# Altium schematic symbol library IntegratedCircuit.SchLib: 131 symbols (part 1 of 3)
Pins are listed as number, name and electrical type; pins without a type are passive.

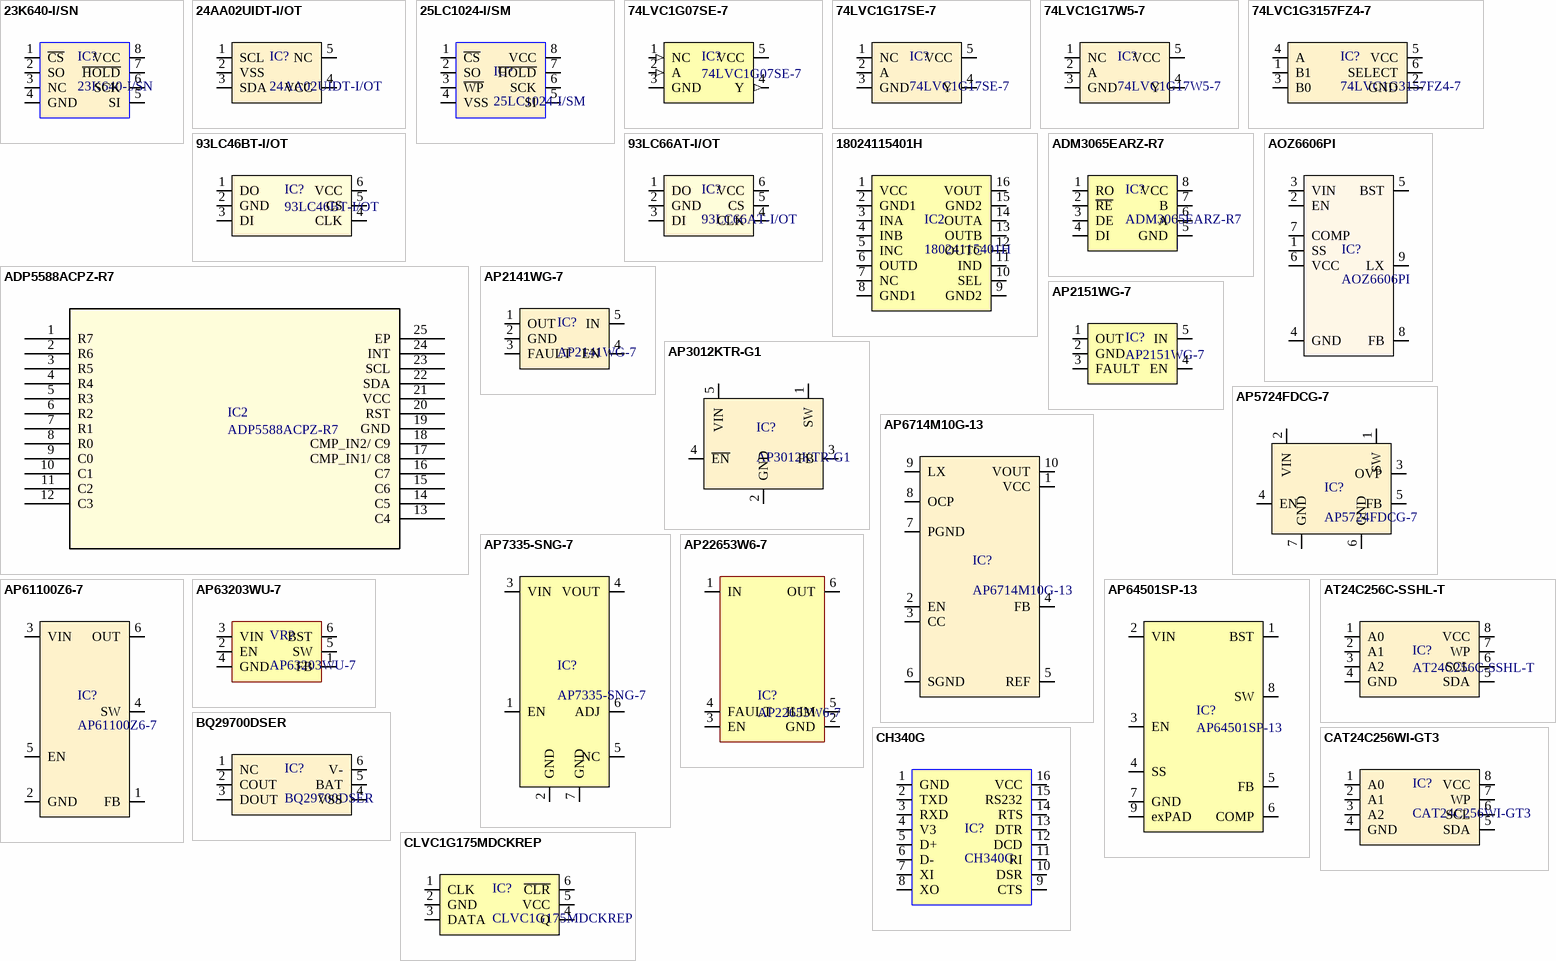
[diagram p0: symbols 23K640-I/SN to CLVC1G175MDCKREP]

## 23K640-I/SN
designator IC?
23K640 Series 2.7 V to 3.6 V 64 kbit SPI Bus Low-Power Serial SRAM - SOIC-8; Manufacturer: Microchip; Organization: 8192 x 8; Purpose Of Usage: BASIC; Supplier 1: Digi-Key; Manufacturer Part Number: 23K640-I/SN; RoHS: YES; Category: INTEGRATED CIRCUITS; Mount: SMD; Case/Package: SOIC; Package Quantity: 100; Lead Free: Lead Free; Supplier Part Number 1: 23K640-I/SN-ND; Sub-Category: MEMORY- RAM; Stock ID: ??
footprint SOIC127P600X175-8N (SOIC, 8-Leads, Body 4.90x3.90mm, Pitch 1.27mm, IPC Medium Density)
pins: 1 ~{CS}, 2 SO, 3 NC, 4 GND, 5 SI, 6 SCK, 7 ~{HOLD}, 8 VCC (power)

## 24AA02UIDT-I/OT
designator IC?
24AA02 Series 2 Kbit (256 x 8) 5.5 V Surface Mount I2C Serial EEPROM - SOT-23-5; Manufacturer: Microchip; Organization: 256X8; Purpose Of Usage: BASIC; Supplier 1: Digi-Key; Manufacturer Part Number: 24AA02UIDT-I/OT; RoHS: YES; Category: INTEGRATED CIRCUITS; Stock 1: 1978; Case/Package: SOT-23-5; Package Quantity: 3000; Lead Free: Lead Free; Supplier Part Number 1: 24AA02UIDT-I/OTTR-ND; Local Supplier: FUTURE; Mount: SMD; Price 10K: 0.25; Stock ID: ??; Sub-Category: MEMORY - EEPROM
footprint SOT23-5 (SOT23, 6-Leads, Body 2.73x2.80mm, Pitch 0.95mm, IPC Medium Density)
pins: 1 SCL, 2 VSS, 3 SDA, 4 VCC, 5 NC

## 25LC1024-I/SM
designator IC?
EEPROM, SERIAL, 1024KBIT, 20MHZ, 8SOIJ; Manufacturer: Microchip; Purpose Of Usage: BASIC; Supplier 1: Digi-Key; Manufacturer Part Number: 25LC1024-I/SM; RoHS: YES; Stock 1: 8902; Mount: SMD; Case/Package: SOIC; Package Quantity: 90; Lead Free: Lead Free; Supplier Part Number 1: 25LC1024-I/SM-ND; Category: INTEGRATED CIRCUITS; Sub-Category: MEMORY - EEPROM; Stock ID: ??
footprint SOIJ8-M_MC-M
pins: 1 ~{CS}, 2 SO, 3 ~{WP}, 4 VSS, 5 SI, 6 SCK, 7 ~{HOLD}, 8 VCC

## 74LVC1G07SE-7
designator IC?
Buffer/Driver 1-CH Non-Inverting Open Drain CMOS 5-Pin SOT-353 T/R; Manufacturer: Diodes; Purpose Of Usage: BASIC; Supplier 1: Digi-Key; Supplier Part Number 1: 74LVC1G07SE-7DICT-ND; Manufacturer Part Number: 74LVC1G07SE-7; Stock 1: 16164; RoHS: YES; Mount: SMD; Case/Package: SOT-353; Package Quantity: 3000; Lead Free: Lead Free; Category: INTEGRATED CIRCUITS; Sub-Category: LOGIC; Stock ID: ??
footprint SOT353
pins: 1 NC (in), 2 A (in), 3 GND (power), 4 Y (out), 5 VCC (power)

## 74LVC1G17SE-7
designator IC?
74LVC Series 5.5 V Surface Mount Single Schmitt Trigger Buffer - SOT-353; Manufacturer: Diodes; Purpose Of Usage: BASIC; Manufacturer Part Number: 74LVC1G17SE-7; RoHS: YES; Category: INTEGRATED CIRCUITS; Case/Package: SOT-353; Lead Free: Lead Free; Local Supplier: FUTURE; Mount: SMD; Price 10K: 0.05; Stock ID: ??; Sub-Category: LOGIC; Supplier 1: Digi-Key; Supplier Part Number 1: 74LVC1G17SE-7CT-ND
footprint SOT353 (SOTFL, 6-Leads, Body 1.55x1.58mm, Pitch 0.50mm, IPC Medium Density)
pins: 1 NC, 2 A, 3 GND, 4 Y, 5 VCC

## 74LVC1G17W5-7
designator IC?
74LVC Series 1.65 to 5.5V Single Schmitt-Trigger Buffer SMT - SOT-25; Manufacturer: Diodes; Purpose Of Usage: BASIC; Supplier 1: Digi-Key; Manufacturer Part Number: 74LVC1G17W5-7; RoHS: YES; Category: INTEGRATED CIRCUITS; Stock 1: 117000; Case/Package: SOT-23-5; Package Quantity: 3000; Lead Free: Lead Free; Supplier Part Number 1: 74LVC1G17W5-7TR-ND; Local Supplier: FUTURE; Mount: SMD; Price 10K: 0.05; Stock ID: ??; Sub-Category: LOGIC
footprint SOT23-5 (SOT23, 6-Leads, Body 2.73x2.80mm, Pitch 0.95mm, IPC Medium Density)
pins: 1 NC, 2 A, 3 GND, 4 Y, 5 VCC

## 74LVC1G3157FZ4-7
designator IC?
Analog Switch Single SPDT 6-Pin X2-DFN T/R; Manufacturer: Diodes; Purpose Of Usage: BASIC; Supplier 1: Digi-Key; Manufacturer Part Number: 74LVC1G3157FZ4-7; RoHS: YES; Category: INTEGRATED CIRCUITS; Stock 1: 130000; Supplier Part Number 1: 74LVC1G3157FZ4-7DITR-ND; Case/Package: UDFN1410-6; Mount: SMD; Stock ID: ??; Sub-Category: ANALOG SWITCH; Lead Free: Lead Free
footprint X2-DFN1410-6 (SON, 6-Leads, Body 1.98x1.98mm, Pitch 0.65mm, Thermal Pad 1.60x0.91mm, IPC Medium Density)
pins: 1 B1, 2 GND, 3 B0, 4 A, 5 VCC, 6 SELECT

## 93LC46BT-I/OT
designator IC?
MICROCHIP - 93LC46BT-I/OT - EEPROM, Microwire, 1 Kbit, 64 x 16bit, Serial Microwire, 3 MHz, SOT-23, 6 Pins; Purpose Of Usage: BASIC; Supplier 1: Digi-Key; Supplier Part Number 1: 93LC46BT-I/OTCT-ND; Manufacturer: Microchip; Manufacturer Part Number: 93LC46BT-I/OT; Stock 1: 3299; RoHS: YES; Mount: SMD; Case/Package: SOT-23; Package Quantity: 3000; Lead Free: Lead Free; Category: INTEGRATED CIRCUITS; Sub-Category: MEMORY - EEPROM; Stock ID: ??
footprint SOT 23-6
pins: 1 DO, 2 GND, 3 DI, 4 CLK, 5 CS, 6 VCC

## 93LC66AT-I/OT
designator IC?
Microwire Serial EEPROM Family, 2.5Vto 5.5V' 2 MHz, -40°Cto 125°C, SOT-23-6, RoHS; Manufacturer: Microchip; Organization: 512X8; Purpose Of Usage: BASIC; Supplier 1: Digi-Key; Manufacturer Part Number: 93LC66AT-I/OT; RoHS: YES; Category: INTEGRATED CIRCUITS; Stock 1: 42000; Case/Package: SOT-23; Package Quantity: 3000; Lead Free: Lead Free; Supplier Part Number 1: 93LC66AT-I/OTTR-ND; Mount: SMD; Stock ID: ??; Sub-Category: MEMORY - EEPROM
footprint SOT23-6 (SOT23, 6-Leads, Body 2.73x2.80mm, Pitch 0.95mm, IPC Medium Density)
pins: 1 DO, 2 GND, 3 DI, 4 CLK, 5 CS, 6 VCC

## 18024115401H
designator IC2
WPME-CDIP Capacitive Digital Isolator Powered; Manufacturer: Wurth Elektronik; Purpose Of Usage: BASIC; Manufacturer Part Number: 18024115401H; Category: INTEGRATED CIRCUITS; Max Operating Temperature: 125°C; Min Operating Temperature: -40°C; Case/Package: SOIC-16W; Lead Free: Lead Free; Mount: SMD; MSL: 1; RoHS: YES; Stock ID: ??; Sub-Category: ISOLATOR; Supplier 1: Digi-Key; Supplier Part Number 1: 732-18024115401HTR-ND
footprint WPME-CDIP_SOIC-16WB
pins: 1 VCC, 2 GND1, 3 INA, 4 INB, 5 INC, 6 OUTD, 7 NC, 8 GND1, 9 GND2, 10 SEL, 11 IND, 12 OUTC, 13 OUTB, 14 OUTA, 15 GND2, 16 VOUT

## ADM3065EARZ-R7
designator IC?
3.0 V to 5.5 V, ±12 kV IEC ESD Protected, Half Duplex 50 Mbps RS-485 Transceiver; Manufacturer: Analog Devices; Max Supply Voltage: 5.5V; Min Supply Voltage: 3V; Purpose Of Usage: BASIC; Manufacturer Part Number: ADM3065EARZ-R7; RoHS: YES; Category: INTEGRATED CIRCUITS; Max Operating Temperature: 85°C; Min Operating Temperature: -40°C; Case/Package: SOIC; Lead Free: Lead Free; Mount: SMD; MSL: 1; Stock ID: ??; Sub-Category: RS485 DRIVER; Supplier 1: Digi-Key; Supplier Part Number 1: 505-ADM3065EARZ-R7TR-ND
footprint SO08
pins: 1 RO, 2 ~{RE}, 3 DE, 4 DI, 5 GND, 6 A, 7 B, 8 VCC

## ADP5588ACPZ-R7
designator IC2
IC KEYPAD SCANNER GPIO PORT EXP; Manufacturer: Analog Devices; Purpose Of Usage: BASIC; Supplier 1: Digi-Key; Manufacturer Part Number: ADP5588ACPZ-R7; Stock 1: 100; RoHS: YES; Mount: SMD; Case/Package: LFCSP EP; Package Quantity: 1500; Lead Free: Contains Lead; Supplier Part Number 1: ADP5588ACPZ-R7DKR-ND; Category: INTEGRATED CIRCUITS; Sub-Category: KEYPAD READER; Stock ID: ??
footprint CP_24_1
pins: 1 R7, 2 R6, 3 R5, 4 R4, 5 R3, 6 R2, 7 R1, 8 R0, 9 C0, 10 C1, 11 C2, 12 C3, 13 C4, 14 C5, 15 C6, 16 C7, 17 CMP_IN1/ C8, 18 CMP_IN2/ C9, 19 GND, 20 RST, 21 VCC (power), 22 SDA, 23 SCL, 24 INT, 25 EP

## AOZ6606PI
designator IC?
Switching Regulator, Current-mode, 6A, 650kHz Switching Freq-Max, PDSO8; Manufacturer: Alpha & Omega Semiconductor; Max Supply Voltage: 15.3V; Min Supply Voltage: 4.5V; Purpose Of Usage: BASIC; Topology: BUCK; Manufacturer Part Number: AOZ6606PI; RoHS: YES; Category: INTEGRATED CIRCUITS; Case/Package: SO-08 EP; Lead Free: Lead Free; Max Operating Temperature: 85°C; Min Operating Temperature: -40°C; Mount: SMD; Stock ID: ??; Sub-Category: PMIC - DC/DC Switching Regulator; Supplier 1: Digi-Key; Supplier Part Number 1: 785-1854-1-ND
footprint SO08 - EP1
pins: 1 SS, 2 EN, 3 VIN, 4 GND, 5 BST, 6 VCC, 7 COMP, 8 FB, 9 LX

## AP2141WG-7
designator IC?
IC PWR SW USB 1CH 0.5A SOT-25-5; Manufacturer: Diodes; Purpose Of Usage: BASIC; Supplier 1: Avnet; Supplier Part Number 1: AP2141WG-7; Manufacturer Part Number: AP2141WG-7; Stock 1: 3000; RoHS: YES; Mount: SMD; Case/Package: SOT-23-5; Package Quantity: 3000; Lead Free: Lead Free; Category: INTEGRATED CIRCUITS; Sub-Category: POWER SWITCH; Stock ID: ??
footprint SOT23-5
pins: 1 OUT, 2 GND, 3 FAULT, 4 EN, 5 IN

## AP2151WG-7
designator IC?
DIODES INC.         AP2151WG-7             Power Load Switch, Current Limited, Single High Side, Active High, 1 Output, 5.5V, 0.8A, SOT-25-5; Purpose Of Usage: BASIC; Topology: HIGH SIDE SWITCH; Min Supply Voltage: 2.7V; Supplier 1: Digi-Key; Manufacturer: Diodes; Manufacturer Part Number: AP2151WG-7; Stock 1: 5836; RoHS: YES; Mount: SMD; Case/Package: SOT-23-5; Package Quantity: 3000; Lead Free: Lead Free; Category: INTEGRATED CIRCUITS; Sub-Category: POWER SWITCH; Supplier Part Number 1: AP2151WGDITR-ND; Stock ID: ??; Max Operating Temperature: +85C; Min Operating Temperature: -40C; Max Supply Voltage: 5.5V
footprint SOT23-5
pins: 1 OUT, 2 GND, 3 FAULT, 4 EN, 5 IN

## AP3012KTR-G1
designator IC?
Boost Switching Regulator IC Positive Adjustable 1.25V 1 Output 500mA (Switch) SC-74A, SOT-753; Manufacturer: Diodes; Purpose Of Usage: BASIC; Supplier 1: Digi-Key; Manufacturer Part Number: AP3012KTR-G1; RoHS: YES; Category: INTEGRATED CIRCUITS; Stock 1: 356500; Case/Package: SOT-23-5; Package Quantity: 3000; Topology: BOOST; Lead Free: Lead Free; Supplier Part Number 1: AP3012KTR-G1DITR-ND; Local Supplier: FUTURE; Mount: SMD; Price 10K: 0.05; Stock ID: ??; Sub-Category: PMIC - DC/DC Switching Regulator
footprint SOT23-5 (SOT23, 6-Leads, Body 2.73x2.80mm, Pitch 0.95mm, IPC Medium Density)
pins: 1 SW, 2 GND, 3 FB, 4 ~{EN}, 5 VIN

## AP5724FDCG-7
designator IC?
AP5724 Series 2.7 to 5.5 V 1.2 MHz Boost SMT White LED Converter - DFN-6; Manufacturer: Diodes; Purpose Of Usage: BASIC; Supplier 1: Mouser; Manufacturer Part Number: AP5724FDCG-7; RoHS: YES; Category: INTEGRATED CIRCUITS; Stock 1: 11765; Case/Package: DFN EP; Package Quantity: 3000; Lead Free: Lead Free; Supplier Part Number 1: 621-AP5724FDCG-7; Mount: SMD; Stock ID: ??; Sub-Category: PMIC - DC/DC Switching Regulator; Local Supplier: FUTURE; Price 10K: 0.27; Topology: BOOST
footprint U-DFN2020-6 TYPE-C (SON, 6-Leads, Body 1.98x1.98mm, Pitch 0.65mm, Thermal Pad 1.60x0.91mm, IPC Medium Density)
pins: 1 SW, 2 VIN, 3 OVP, 4 EN, 5 FB, 6 GND, 7 GND

## AP6714M10G-13
designator IC?
Conv DC-DC 0.9V to 5.5V Synchronous Step Up Single-Out 1.8V to 5.5V 1.6A 10-Pin MSOP T/R; Manufacturer: Diodes; Topology: BOOST; Purpose Of Usage: BASIC; Supplier 1: Digi-Key; Manufacturer Part Number: AP6714M10G-13; RoHS: YES; Category: INTEGRATED CIRCUITS; Case/Package: MSOP; Package Quantity: 1; Lead Free: Lead Free; Supplier Part Number 1: AP6714M10GDITR-ND; Local Supplier: FUTURE; Mount: SMD; Price 10K: 0.25; Stock ID: ??; Sub-Category: PMIC - DC/DC Switching Regulator
footprint MSOP-10 (TSOP, 8-Leads, Body 2.95x2.95mm, Pitch 0.65mm, IPC Medium Density)
pins: 1 VCC, 2 EN, 3 CC, 4 FB, 5 REF, 6 SGND, 7 PGND, 8 OCP, 9 LX, 10 VOUT

## AP7335-SNG-7
designator IC?
LDO Regulator Pos 0.8V to 5V 0.3A 6-Pin DFN EP T/R; Manufacturer: Diodes; Purpose Of Usage: BASIC; Max Supply Voltage: 6V; Supplier 1: Digi-Key; Manufacturer Part Number: AP7335-SNG-7; RoHS: YES; Category: INTEGRATED CIRCUITS; Case/Package: DFN EP; Package Quantity: 3000; Supplier Part Number 1: AP7335-SNG-7DI-ND; Lead Free: Lead Free; Mount: SMD; Stock ID: ??; Sub-Category: PMIC - LINEAR REGULATOR; Local Supplier: FUTURE; Price 10K: 0.0918; Topology: LDO; Max Operating Temperature: +85; Min Operating Temperature: -40; Min Supply Voltage: 0.8V
footprint U-DFN2020-6 TYPE-C (SON, 6-Leads, Body 1.98x1.98mm, Pitch 0.65mm, Thermal Pad 1.60x0.91mm, IPC Medium Density)
pins: 1 EN, 2 GND, 3 VIN, 4 VOUT, 5 NC, 6 ADJ, 7 GND

## AP22653W6-7
designator IC?
Power Switch/Driver 1:1 P-Channel 2.1A SOT-23-6; Manufacturer: Diodes; Purpose Of Usage: BASIC; Supplier 1: Digi-Key; Manufacturer Part Number: AP22653W6-7; Stock 1: 12659; RoHS: NO; Supplier Part Number 1: 31-AP22653W6-7CT-ND; Category: INTEGRATED CIRCUITS; Sub-Category: POWER SWITCH; Mount: SMD; Case/Package: SOT-23-6; Lead Free: Lead Free; Stock ID: ??
footprint SOT23-6 (SOT23, 6-Leads, Body 2.73x2.80mm, Pitch 0.95mm, IPC Medium Density)
pins: 1 IN, 2 GND, 3 EN, 4 FAULT, 5 ILIM, 6 OUT

## AP61100Z6-7
designator IC?
Converter DC to DC Synchronous Buck 0.8V to 7V 3A 6-Pin SOT-563 T/R; Manufacturer: Diodes; Purpose Of Usage: BASIC; Supplier 1: Digi-Key; Manufacturer Part Number: AP61100Z6-7; RoHS: YES; Category: INTEGRATED CIRCUITS; Stock 1: 237789; Supplier Part Number 1: 31-AP61100Z6-7DKR-ND; Case/Package: SOT563; Lead Free: Lead Free; Mount: SMD; Package Quantity: 3000; Stock ID: ??; Sub-Category: PMIC - DC/DC Switching Regulator; Local Supplier: FUTURE; Price 10K: 0.07; Topology: BUCK
footprint SOT563 (SOTFL, 6-Leads, Body 1.55x1.58mm, Pitch 0.50mm, IPC Medium Density)
pins: 1 FB, 2 GND, 3 VIN, 4 SW, 5 EN, 6 OUT

## AP63203WU-7
designator VR?
Manufacturer: Diodes; Purpose Of Usage: BASIC; Topology: BUCK; Supplier 1: Digi-Key; Manufacturer Part Number: AP63203WU-7; Stock 1: 2397; RoHS: NO; Supplier Part Number 1: AP63203WU-7DICT-ND; Category: INTEGRATED CIRCUITS; Mount: SMD; Sub-Category: PMIC - DC/DC Switching Regulator; Case/Package: TSOT-26; Lead Free: Lead Free; Stock ID: ??
footprint TSOT26
pins: 1 FB, 2 EN, 3 VIN, 4 GND, 5 SW, 6 BST

## AP64501SP-13
designator IC?
Buck Switching Regulator IC Positive Adjustable 0.8V 1 Output 5A 8-SOIC (0.154", 3.90mm Width) Exposed Pad; Manufacturer: Diodes; Purpose Of Usage: BASIC; Max Supply Voltage: 40V; Min Supply Voltage: 3.8V; Supplier 1: Digi-Key; Manufacturer Part Number: AP64501SP-13; Stock 1: 17836; RoHS: NO; Category: INTEGRATED CIRCUITS; Supplier Part Number 1: 31-AP64501SP-13CT-ND; Mount: SMD; Sub-Category: PMIC - DC/DC Switching Regulator; Case/Package: SO-8EP; Lead Free: Lead Free; Stock ID: ??; Topology: BUCK; Max Operating Temperature: -40; Min Operating Temperature: +85
footprint SO08 - EP1
pins: 1 BST, 2 VIN, 3 EN, 4 SS, 5 FB, 6 COMP, 7 GND, 8 SW, 9 exPAD

## AT24C256C-SSHL-T
designator IC?
EEPROM Serial-2Wire 256K-bit 32K x 8 1.8V/2.5V/3.3V/5V 8-Pin SOIC T/R; Manufacturer: Microchip / Atmel; Purpose Of Usage: BASIC; Supplier 1: Digi-Key; Manufacturer Part Number: AT24C256C-SSHL-T; Stock 1: 15972; RoHS: YES; Mount: SMD; Case/Package: SOIC; Package Quantity: 1; Lead Free: Lead Free; Category: INTEGRATED CIRCUITS; Supplier Part Number 1: AT24C256C-SSHL-TCT-ND; Sub-Category: MEMORY - EEPROM; Stock ID: ??
footprint SOIC127P600X175-8N (SOIC, 8-Leads, Body 4.90x3.90mm, Pitch 1.27mm, IPC Medium Density)
pins: 1 A0, 2 A1, 3 A2, 4 GND, 5 SDA, 6 SCL, 7 WP, 8 VCC

## BQ29700DSER
designator IC?
Li-Ion/Li Polymer Advanced Single-Cell Battery Protector IC Family 6-WSON -40 to 85; Manufacturer: Texas Instruments; Purpose Of Usage: BASIC; Supplier 1: Digi-Key; Manufacturer Part Number: BQ29700DSER; RoHS: YES; Category: INTEGRATED CIRCUITS; Stock 1: 64646; Case/Package: WFDFN; Package Quantity: 3000; Lead Free: Lead Free; Supplier Part Number 1: 296-43985-1-ND; Local Supplier: TEXAS INS; Mount: SMD; Price 10K: 0.25; Stock ID: ??; Sub-Category: BATTERY MANAGEMENT
footprint WSON-6 (SON, 6-Leads, Body 1.98x1.98mm, Pitch 0.65mm, Thermal Pad 1.60x0.91mm, IPC Medium Density)
pins: 1 NC, 2 COUT, 3 DOUT, 4 VSS, 5 BAT, 6 V-

## CAT24C256WI-GT3
designator IC?
IC EEPROM 256KBIT 400KHZ 8SOIC; Manufacturer: ON Semiconductor; Purpose Of Usage: BASIC; Manufacturer Part Number: CAT24C256WI-GT3; RoHS: YES; Category: INTEGRATED CIRCUITS; Case/Package: SOIC; Lead Free: Lead Free; Local Supplier: FUTURE; Mount: SMD; Price 10K: 0.75; Stock ID: ??; Sub-Category: MEMORY - EEPROM; Supplier 1: Digi-Key; Supplier Part Number 1: CAT24C256WI-GT3OSCT-ND
footprint SOIC127P600X175-8N (SOIC, 8-Leads, Body 4.90x3.90mm, Pitch 1.27mm, IPC Medium Density)
pins: 1 A0, 2 A1, 3 A2, 4 GND, 5 SDA, 6 SCL, 7 WP, 8 VCC

## CH340G
designator IC?
IC-340 USB INTERFACE SO16; Manufacturer: WCH; Purpose Of Usage: BASIC; Category: INTEGRATED CIRCUITS; Sub-Category: USB to UART; Case/Package: SOIC; Mount: SMD; RoHS: NO; Lead Free: Contains Lead; Manufacturer Part Number: CH340G; Supplier 1: Özdisan; Supplier Part Number 1: CH340G; Stock ID: ??
footprint SOIC 16 (SOIC, 16-Leads, Body 9.90x3.90mm, Pitch 1.27mm, IPC Medium Density)
pins: 1 GND, 2 TXD, 3 RXD, 4 V3, 5 D+, 6 D-, 7 XI, 8 XO, 9 CTS, 10 DSR, 11 RI, 12 DCD, 13 DTR, 14 RTS, 15 RS232, 16 VCC

## CLVC1G175MDCKREP
designator IC?
Enhanced Product Single D-Type Flip-Flop With Asynchronous Clear 6-SC70 -55 to 125; Manufacturer: Texas Instruments; Max Supply Voltage: 5.5V; Min Supply Voltage: 1.65V; Purpose Of Usage: BASIC; Topology: D-FLIP_FLOP; Manufacturer Part Number: CLVC1G175MDCKREP; RoHS: YES; Category: INTEGRATED CIRCUITS; Case/Package: SOT-363; Lead Free: Lead Free; Max Operating Temperature: 125°C; Min Operating Temperature: -55°C; Mount: SMD; MSL: 1; Stock ID: ??; Sub-Category: LOGIC; Supplier 1: Digi-Key; Supplier Part Number 1: 296-22111-2-ND
footprint SOT363 (SOTFL, 6-Leads, Body 1.55x1.58mm, Pitch 0.50mm, IPC Medium Density)
pins: 1 CLK, 2 GND, 3 DATA, 4 Q, 5 VCC, 6 ~{CLR}

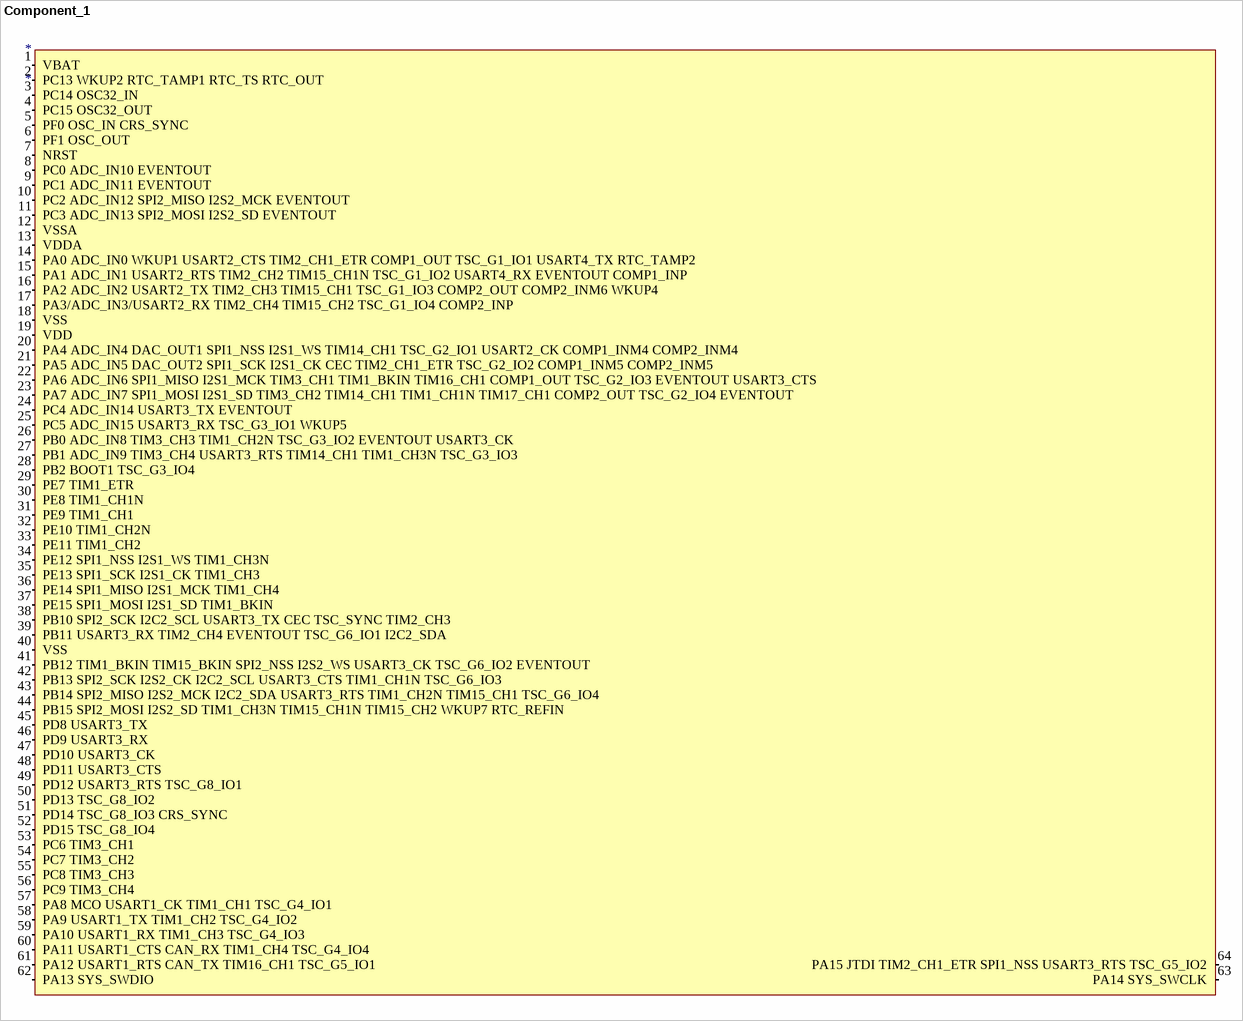
[diagram p1: symbol Component_1]

## Component_1
designator *
pins: 1 VBAT (in), 2 PC13 WKUP2 RTC_TAMP1 RTC_TS RTC_OUT (in), 3 PC14 OSC32_IN (in), 4 PC15 OSC32_OUT (in), 5 PF0 OSC_IN CRS_SYNC (in), 6 PF1 OSC_OUT (in), 7 NRST (in), 8 PC0 ADC_IN10 EVENTOUT (in), 9 PC1 ADC_IN11 EVENTOUT (in), 10 PC2 ADC_IN12 SPI2_MISO I2S2_MCK EVENTOUT (in), 11 PC3 ADC_IN13 SPI2_MOSI I2S2_SD EVENTOUT (in), 12 VSSA (in), 13 VDDA (in), 14 PA0 ADC_IN0 WKUP1 USART2_CTS TIM2_CH1_ETR COMP1_OUT TSC_G1_IO1 USART4_TX RTC_TAMP2 (in), 15 PA1 ADC_IN1 USART2_RTS TIM2_CH2 TIM15_CH1N TSC_G1_IO2 USART4_RX EVENTOUT COMP1_INP (in), 16 PA2 ADC_IN2 USART2_TX TIM2_CH3 TIM15_CH1 TSC_G1_IO3 COMP2_OUT COMP2_INM6 WKUP4 (in), 17 PA3/ADC_IN3/USART2_RX TIM2_CH4 TIM15_CH2 TSC_G1_IO4 COMP2_INP (in), 18 VSS (in), 19 VDD (in), 20 PA4 ADC_IN4 DAC_OUT1 SPI1_NSS I2S1_WS TIM14_CH1 TSC_G2_IO1 USART2_CK COMP1_INM4 COMP2_INM4 (in), 21 PA5 ADC_IN5 DAC_OUT2 SPI1_SCK I2S1_CK CEC TIM2_CH1_ETR TSC_G2_IO2 COMP1_INM5 COMP2_INM5 (in), 22 PA6 ADC_IN6 SPI1_MISO I2S1_MCK TIM3_CH1 TIM1_BKIN TIM16_CH1 COMP1_OUT TSC_G2_IO3 EVENTOUT USART3_CTS (in), 23 PA7 ADC_IN7 SPI1_MOSI I2S1_SD TIM3_CH2 TIM14_CH1 TIM1_CH1N TIM17_CH1 COMP2_OUT TSC_G2_IO4 EVENTOUT (in), 24 PC4 ADC_IN14 USART3_TX EVENTOUT (in), 25 PC5 ADC_IN15 USART3_RX TSC_G3_IO1 WKUP5 (in), 26 PB0 ADC_IN8 TIM3_CH3 TIM1_CH2N TSC_G3_IO2 EVENTOUT USART3_CK (in), 27 PB1 ADC_IN9 TIM3_CH4 USART3_RTS TIM14_CH1 TIM1_CH3N TSC_G3_IO3 (in), 28 PB2 BOOT1 TSC_G3_IO4 (in), 29 PE7 TIM1_ETR (in), 30 PE8 TIM1_CH1N (in), 31 PE9 TIM1_CH1 (in), 32 PE10 TIM1_CH2N (in), 33 PE11 TIM1_CH2 (in), 34 PE12 SPI1_NSS I2S1_WS TIM1_CH3N (in), 35 PE13 SPI1_SCK I2S1_CK TIM1_CH3 (in), 36 PE14 SPI1_MISO I2S1_MCK TIM1_CH4 (in), 37 PE15 SPI1_MOSI I2S1_SD TIM1_BKIN (in), 38 PB10 SPI2_SCK I2C2_SCL USART3_TX CEC TSC_SYNC TIM2_CH3 (in), 39 PB11 USART3_RX TIM2_CH4 EVENTOUT TSC_G6_IO1 I2C2_SDA (in), 40 VSS (in), 41 PB12 TIM1_BKIN TIM15_BKIN SPI2_NSS I2S2_WS USART3_CK TSC_G6_IO2 EVENTOUT (in), 42 PB13 SPI2_SCK I2S2_CK I2C2_SCL USART3_CTS TIM1_CH1N TSC_G6_IO3 (in), 43 PB14 SPI2_MISO I2S2_MCK I2C2_SDA USART3_RTS TIM1_CH2N TIM15_CH1 TSC_G6_IO4 (in), 44 PB15 SPI2_MOSI I2S2_SD TIM1_CH3N TIM15_CH1N TIM15_CH2 WKUP7 RTC_REFIN (in), 45 PD8 USART3_TX (in), 46 PD9 USART3_RX (in), 47 PD10 USART3_CK (in), 48 PD11 USART3_CTS (in), 49 PD12 USART3_RTS TSC_G8_IO1 (in), 50 PD13 TSC_G8_IO2 (in), 51 PD14 TSC_G8_IO3 CRS_SYNC (in), 52 PD15 TSC_G8_IO4 (in), 53 PC6 TIM3_CH1 (in), 54 PC7 TIM3_CH2 (in), 55 PC8 TIM3_CH3 (in), 56 PC9 TIM3_CH4 (in), 57 PA8 MCO USART1_CK TIM1_CH1 TSC_G4_IO1 (in), 58 PA9 USART1_TX TIM1_CH2 TSC_G4_IO2 (in), 59 PA10 USART1_RX TIM1_CH3 TSC_G4_IO3 (in), 60 PA11 USART1_CTS CAN_RX TIM1_CH4 TSC_G4_IO4 (in), 61 PA12 USART1_RTS CAN_TX TIM16_CH1 TSC_G5_IO1 (in), 62 PA13 SYS_SWDIO (in), 63 PA14 SYS_SWCLK (in), 64 PA15 JTDI TIM2_CH1_ETR SPI1_NSS USART3_RTS TSC_G5_IO2 (in)

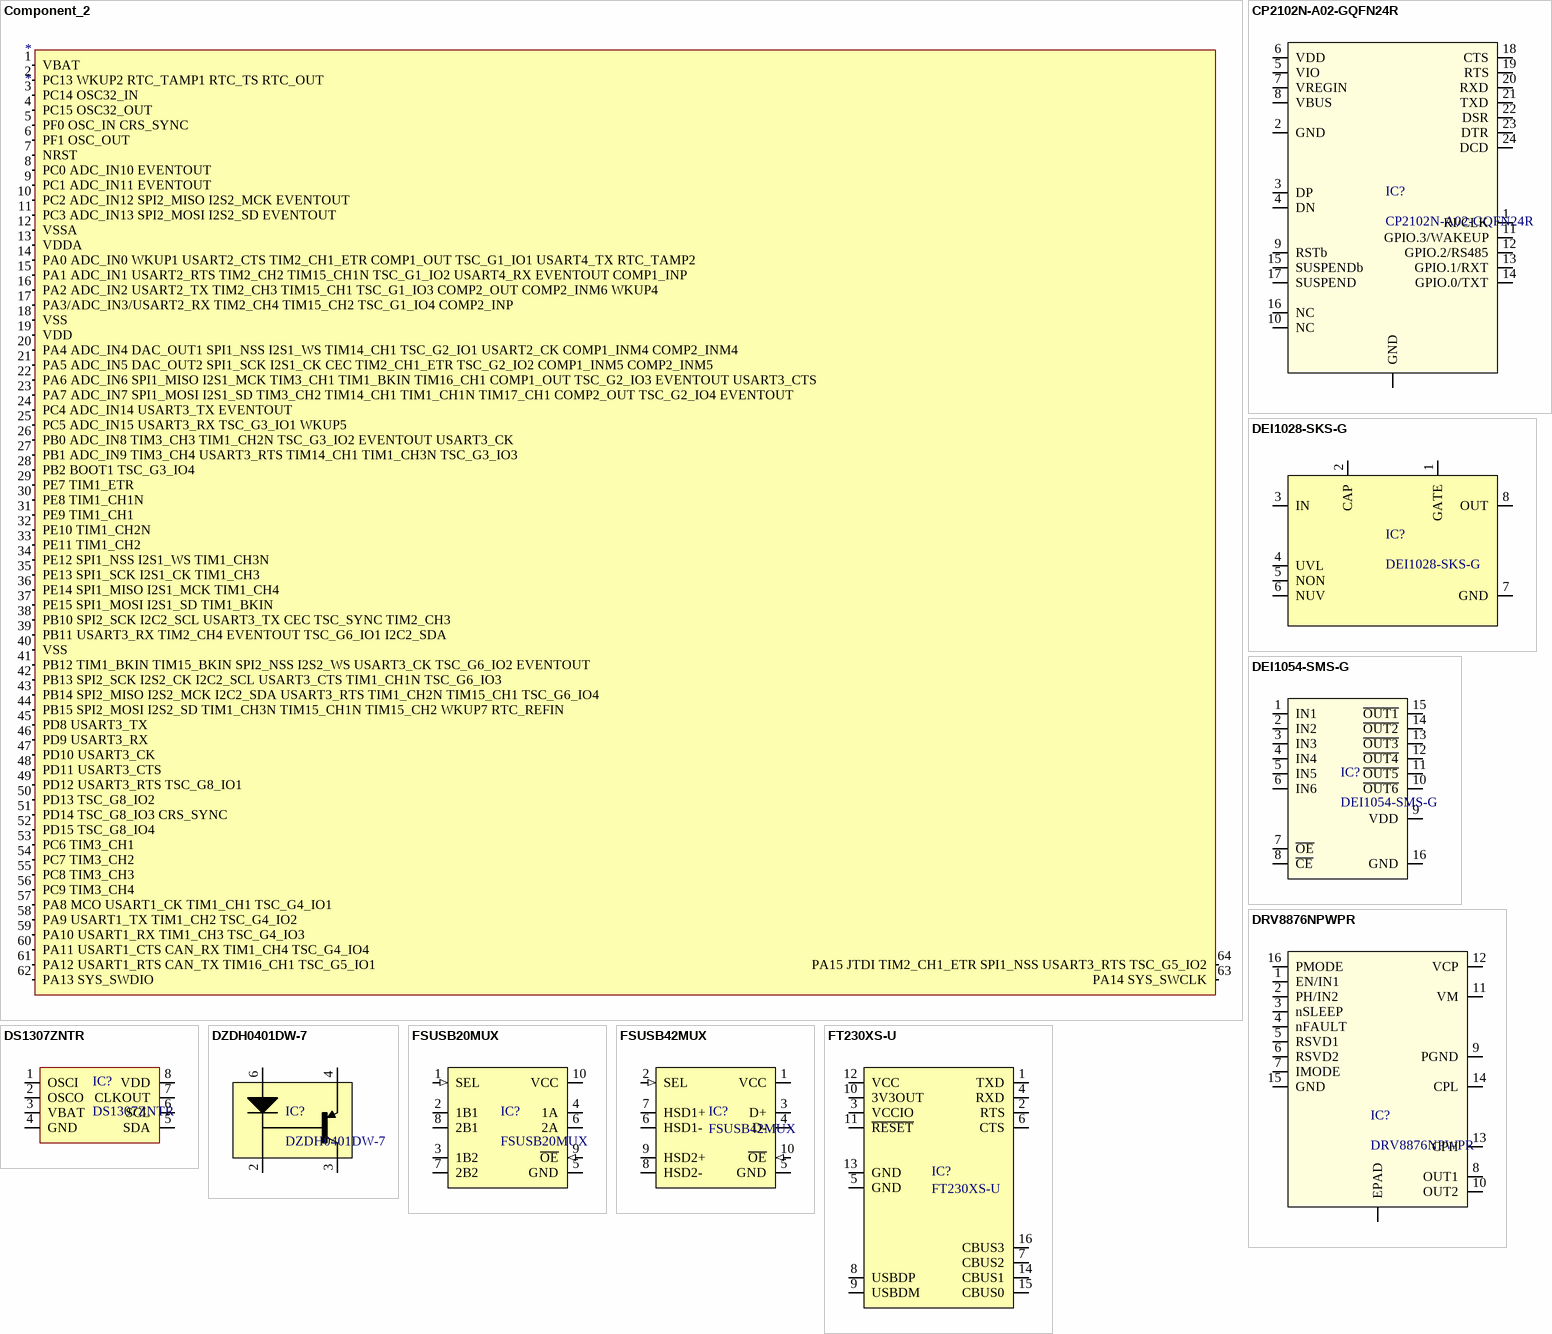
[diagram p2: symbols Component_2 to FT230XS-U]

## Component_2
designator *
pins: 1 VBAT (in), 2 PC13 WKUP2 RTC_TAMP1 RTC_TS RTC_OUT (in), 3 PC14 OSC32_IN (in), 4 PC15 OSC32_OUT (in), 5 PF0 OSC_IN CRS_SYNC (in), 6 PF1 OSC_OUT (in), 7 NRST (in), 8 PC0 ADC_IN10 EVENTOUT (in), 9 PC1 ADC_IN11 EVENTOUT (in), 10 PC2 ADC_IN12 SPI2_MISO I2S2_MCK EVENTOUT (in), 11 PC3 ADC_IN13 SPI2_MOSI I2S2_SD EVENTOUT (in), 12 VSSA (in), 13 VDDA (in), 14 PA0 ADC_IN0 WKUP1 USART2_CTS TIM2_CH1_ETR COMP1_OUT TSC_G1_IO1 USART4_TX RTC_TAMP2 (in), 15 PA1 ADC_IN1 USART2_RTS TIM2_CH2 TIM15_CH1N TSC_G1_IO2 USART4_RX EVENTOUT COMP1_INP (in), 16 PA2 ADC_IN2 USART2_TX TIM2_CH3 TIM15_CH1 TSC_G1_IO3 COMP2_OUT COMP2_INM6 WKUP4 (in), 17 PA3/ADC_IN3/USART2_RX TIM2_CH4 TIM15_CH2 TSC_G1_IO4 COMP2_INP (in), 18 VSS (in), 19 VDD (in), 20 PA4 ADC_IN4 DAC_OUT1 SPI1_NSS I2S1_WS TIM14_CH1 TSC_G2_IO1 USART2_CK COMP1_INM4 COMP2_INM4 (in), 21 PA5 ADC_IN5 DAC_OUT2 SPI1_SCK I2S1_CK CEC TIM2_CH1_ETR TSC_G2_IO2 COMP1_INM5 COMP2_INM5 (in), 22 PA6 ADC_IN6 SPI1_MISO I2S1_MCK TIM3_CH1 TIM1_BKIN TIM16_CH1 COMP1_OUT TSC_G2_IO3 EVENTOUT USART3_CTS (in), 23 PA7 ADC_IN7 SPI1_MOSI I2S1_SD TIM3_CH2 TIM14_CH1 TIM1_CH1N TIM17_CH1 COMP2_OUT TSC_G2_IO4 EVENTOUT (in), 24 PC4 ADC_IN14 USART3_TX EVENTOUT (in), 25 PC5 ADC_IN15 USART3_RX TSC_G3_IO1 WKUP5 (in), 26 PB0 ADC_IN8 TIM3_CH3 TIM1_CH2N TSC_G3_IO2 EVENTOUT USART3_CK (in), 27 PB1 ADC_IN9 TIM3_CH4 USART3_RTS TIM14_CH1 TIM1_CH3N TSC_G3_IO3 (in), 28 PB2 BOOT1 TSC_G3_IO4 (in), 29 PE7 TIM1_ETR (in), 30 PE8 TIM1_CH1N (in), 31 PE9 TIM1_CH1 (in), 32 PE10 TIM1_CH2N (in), 33 PE11 TIM1_CH2 (in), 34 PE12 SPI1_NSS I2S1_WS TIM1_CH3N (in), 35 PE13 SPI1_SCK I2S1_CK TIM1_CH3 (in), 36 PE14 SPI1_MISO I2S1_MCK TIM1_CH4 (in), 37 PE15 SPI1_MOSI I2S1_SD TIM1_BKIN (in), 38 PB10 SPI2_SCK I2C2_SCL USART3_TX CEC TSC_SYNC TIM2_CH3 (in), 39 PB11 USART3_RX TIM2_CH4 EVENTOUT TSC_G6_IO1 I2C2_SDA (in), 40 VSS (in), 41 PB12 TIM1_BKIN TIM15_BKIN SPI2_NSS I2S2_WS USART3_CK TSC_G6_IO2 EVENTOUT (in), 42 PB13 SPI2_SCK I2S2_CK I2C2_SCL USART3_CTS TIM1_CH1N TSC_G6_IO3 (in), 43 PB14 SPI2_MISO I2S2_MCK I2C2_SDA USART3_RTS TIM1_CH2N TIM15_CH1 TSC_G6_IO4 (in), 44 PB15 SPI2_MOSI I2S2_SD TIM1_CH3N TIM15_CH1N TIM15_CH2 WKUP7 RTC_REFIN (in), 45 PD8 USART3_TX (in), 46 PD9 USART3_RX (in), 47 PD10 USART3_CK (in), 48 PD11 USART3_CTS (in), 49 PD12 USART3_RTS TSC_G8_IO1 (in), 50 PD13 TSC_G8_IO2 (in), 51 PD14 TSC_G8_IO3 CRS_SYNC (in), 52 PD15 TSC_G8_IO4 (in), 53 PC6 TIM3_CH1 (in), 54 PC7 TIM3_CH2 (in), 55 PC8 TIM3_CH3 (in), 56 PC9 TIM3_CH4 (in), 57 PA8 MCO USART1_CK TIM1_CH1 TSC_G4_IO1 (in), 58 PA9 USART1_TX TIM1_CH2 TSC_G4_IO2 (in), 59 PA10 USART1_RX TIM1_CH3 TSC_G4_IO3 (in), 60 PA11 USART1_CTS CAN_RX TIM1_CH4 TSC_G4_IO4 (in), 61 PA12 USART1_RTS CAN_TX TIM16_CH1 TSC_G5_IO1 (in), 62 PA13 SYS_SWDIO (in), 63 PA14 SYS_SWCLK (in), 64 PA15 JTDI TIM2_CH1_ETR SPI1_NSS USART3_RTS TSC_G5_IO2 (in)

## CP2102N-A02-GQFN24R
designator IC?
IC Usb to Uart Bridge QFN24 / Usb Bridge, Usb to Uart Usb 2.0 Uart Interface 24-QFN (4X4); Manufacturer: Silicon Lab; Max Supply Voltage: 3.6V; Min Supply Voltage: 3V; Purpose Of Usage: BASIC; Manufacturer Part Number: CP2102N-A02-GQFN24R; RoHS: YES; Category: INTEGRATED CIRCUITS; Max Operating Temperature: 85°C; Min Operating Temperature: -40°C; Case/Package: QFN; Lead Free: Lead Free; Mount: SMD; MSL: 1; Stock ID: ??; Sub-Category: USB to UART; Supplier 1: Digi-Key; Supplier Part Number 1: 336-5888-2-ND
footprint QFN24
pins: 1 RI/CLK, 2 GND, 3 DP, 4 DN, 5 VIO, 6 VDD, 7 VREGIN, 8 VBUS, 9 RSTb, 10 NC, 11 GPIO.3/WAKEUP, 12 GPIO.2/RS485, 13 GPIO.1/RXT, 14 GPIO.0/TXT, 15 SUSPENDb, 16 NC, 17 SUSPEND, 18 CTS, 19 RTS, 20 RXD, 21 TXD, 22 DSR, 23 DTR, 24 DCD, 25 GND

## DEI1028-SKS-G
designator IC?
Protection for power electronics on 28VDC avionics or industrial power bus to DO-160, Category Z, Abnormal Surge Voltage (DC) levels.; Manufacturer: Device Engineering Inc.; Max Supply Voltage: 40V; Min Supply Voltage: 10V; Purpose Of Usage: BASIC; Case/Package: SOIC; Category: INTEGRATED CIRCUITS; Lead Free: Lead Free; Manufacturer Part Number: DEI1028-SKS-G; Max Operating Temperature: -105°C; Min Operating Temperature: -55°C; Mount: SMD; MSL: 1; RoHS: YES; Stock 1: ??; Stock ID: ??; Sub-Category: VOLTAGE CLAMPING CONTROLLER; Supplier 1: ??; Supplier Part Number 1: DEI1028-SKS-G
footprint SO08
pins: 1 GATE, 2 CAP, 3 IN, 4 UVL, 5 NON, 6 NUV, 7 GND, 8 OUT

## DEI1054-SMS-G
designator IC?
6-Channel Discrete-to-Digital 28V / Open Sensors with Integrated Lightning Protection; Manufacturer: Device Engineering Inc.; Max Supply Voltage: 7V; Min Supply Voltage: 0V; Purpose Of Usage: BASIC; Manufacturer Part Number: DEI1054-SMS-G; Case/Package: SOIC; Category: INTEGRATED CIRCUITS; Lead Free: Lead Free; Max Operating Temperature: 125°C; Min Operating Temperature: -55°C; Mount: SMD; MSL: 1; RoHS: NO; Stock 1: ??; Stock ID: ??; Sub-Category: LOGIC; Supplier 1: ??; Supplier Part Number 1: DEI1054-SMS-G
footprint SOIC 16 (SOIC, 16-Leads, Body 9.90x3.90mm, Pitch 1.27mm, IPC Medium Density)
pins: 1 IN1, 2 IN2, 3 IN3, 4 IN4, 5 IN5, 6 IN6, 7 ~{OE}, 8 ~{CE}, 9 VDD, 10 ~{OUT6}, 11 ~{OUT5}, 12 ~{OUT4}, 13 ~{OUT3}, 14 ~{OUT2}, 15 ~{OUT1}, 16 GND

## DRV8876NPWPR
designator IC?
37-V, 3.5-A brushed DC motor driver 16-HTSSOP -40 to 125; Manufacturer: Texas Instruments; Max Supply Voltage: 35V; Min Supply Voltage: 4.5V; Purpose Of Usage: BASIC; Manufacturer Part Number: DRV8876NPWPR; RoHS: YES; Category: INTEGRATED CIRCUITS; Case/Package: HTSSOP - 16; Lead Free: Lead Free; Max Operating Temperature: 85°C; Min Operating Temperature: -40°C; Mount: SMD; Stock ID: ??; Sub-Category: MOTOR DRIVER; Supplier 1: Digikey; Supplier Part Number 1: 296-DRV8876NPWPRCT-ND; Topology: BRUSHED DC
footprint HTSSOP16_4P4X5_TEX-M
pins: 1 EN/IN1, 2 PH/IN2, 3 nSLEEP, 4 nFAULT, 5 RSVD1, 6 RSVD2, 7 IMODE, 8 OUT1, 9 PGND, 10 OUT2, 11 VM, 12 VCP, 13 CPH, 14 CPL, 15 GND, 16 PMODE, EPAD

## DS1307ZNTR
designator IC?
IC RTC SERIAL 512K IND 8-SOIC; Manufacturer: Maxim; Purpose Of Usage: BASIC; Supplier 1: Digi-Key; Manufacturer Part Number: DS1307ZNTR; Stock 1: 0; RoHS: YES; Mount: SMD; Case/Package: SOIC; Package Quantity: 2500; Lead Free: Lead Free; Supplier Part Number 1: DS1307ZN+T&R-ND; Category: INTEGRATED CIRCUITS; Sub-Category: REAL TIME CLOCK; Stock ID: ??
footprint SOIC127P600X175-8N (SOIC, 8-Leads, Body 4.90x3.90mm, Pitch 1.27mm, IPC Medium Density)
pins: 1 OSCI, 2 OSCO, 3 VBAT, 4 GND, 5 SDA, 6 SCL, 7 CLKOUT, 8 VDD

## DZDH0401DW-7
designator IC?
DZDH0401 Series 40 V 300 mA Surface Mount Ideal Diode Controller - SOT-363; Manufacturer: Diodes Inc.; Purpose Of Usage: BASIC; Supplier 1: Digi-Key; Manufacturer Part Number: DZDH0401DW-7; Stock 1: 856; Supplier Part Number 1: 31-DZDH0401DW-7DKR-ND; Case/Package: SOT-363; Category: INTEGRATED CIRCUITS; Lead Free: Lead Free; Local Supplier: FUTURE; Mount: SMD; Stock ID: ??; Sub-Category: OR-ING IDEAL DIODE CONTROLLER
footprint SOT363 (SOTFL, 6-Leads, Body 1.55x1.58mm, Pitch 0.50mm, IPC Medium Density)
pins: 2 K, 3 C, 4 E, 6 A

## FSUSB20MUX
designator IC?
FAIRCHILD SEMICONDUCTOR         FSUSB20MUX             USB Interface, Switch, USB 2.0, 3 V, 3.6 V, MSOP, 10 Pins; Manufacturer: ON Semiconductor / Fairchild; Purpose Of Usage: BASIC; Supplier 1: Digi-Key; Manufacturer Part Number: FSUSB20MUX; Stock 1: 7192; RoHS: YES; Mount: SMD; Case/Package: MSOP; Package Quantity: 4000; Lead Free: Lead Free; Supplier Part Number 1: FSUSB20MUXCT-ND; Category: INTEGRATED CIRCUITS; Sub-Category: USB SWITCH; Stock ID: ??
footprint MSOP-10N
pins: 1 SEL (in), 2 1B1 (io), 3 1B2 (io), 4 1A (io), 5 GND (power), 6 2A (io), 7 2B2 (io), 8 2B1 (io), 9 ~{OE} (in), 10 VCC (power)

## FSUSB42MUX
designator IC?
ON SEMICONDUCTOR - FSUSB42MUX - Analogue Switch, UART, 2 Channels, DPDT, 4.5 ohm, 2.4V to 3.6V, MSOP, 10 Pins; Manufacturer: ON Semiconductor / Fairchild; Purpose Of Usage: BASIC; Supplier 1: Digi-Key; Manufacturer Part Number: FSUSB42MUX; Stock 1: 14606; RoHS: YES; Mount: SMD; Case/Package: MSOP; Package Quantity: 1; Lead Free: Lead Free; Supplier Part Number 1: FSUSB42MUXCT-ND; Category: INTEGRATED CIRCUITS; Sub-Category: USB SWITCH; Stock ID: ??
footprint MSOP-10N
pins: 1 VCC (power), 2 SEL (in), 3 D+ (io), 4 D- (io), 5 GND (power), 6 HSD1- (io), 7 HSD1+ (io), 8 HSD2- (io), 9 HSD2+ (io), 10 ~{OE} (in)

## FT230XS-U
designator IC?
USB Interface IC USB to Basic Serial UART IC SSOP-16; Manufacturer: FTDI; Supplier 1: Digi-Key; Manufacturer Part Number: FT230XS-U; Stock 1: 4799; RoHS: YES; Case/Package: SSOP; Package Quantity: 100; Lead Free: Lead Free; Category: INTEGRATED CIRCUITS; Supplier Part Number 1: 768-1154-5-ND; Sub-Category: USB to UART; Mount: SMD; Stock ID: ??; Purpose Of Usage: BASIC
footprint SSOP-16
pins: 1 TXD, 2 RTS, 3 VCCIO, 4 RXD, 5 GND, 6 CTS, 7 CBUS2, 8 USBDP, 9 USBDM, 10 3V3OUT, 11 ~{RESET}, 12 VCC, 13 GND, 14 CBUS1, 15 CBUS0, 16 CBUS3

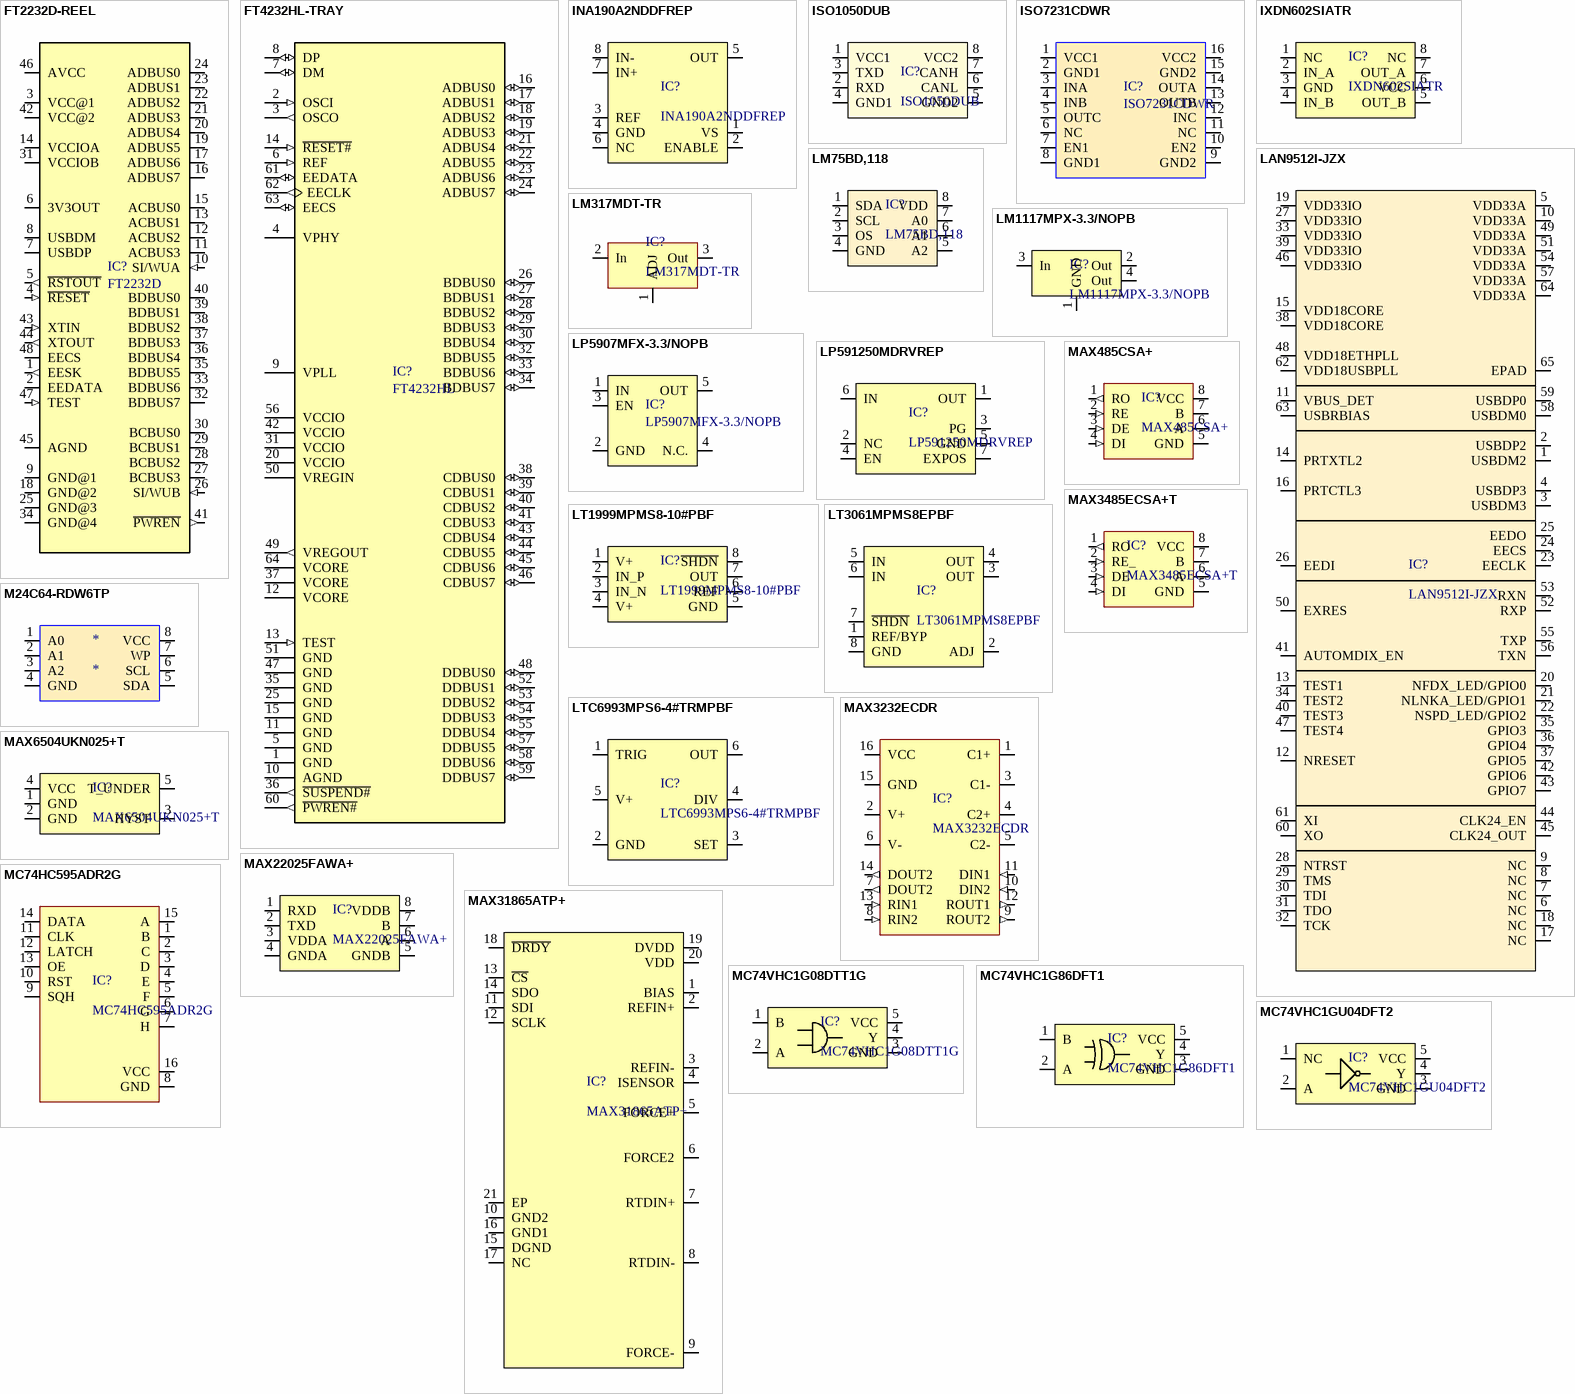
[diagram p3: symbols FT2232D-REEL to MC74VHC1GU04DFT2]

## FT2232D-REEL
designator IC?, comment FT2232D
USB-to-UART 2-CH 3.3V/5V 48-Pin LQFP; Manufacturer: FTDI; Manufacturer Part Number: FT2232D-REEL; Purpose Of Usage: BASIC; Supplier 1: Digi-Key; Stock 1: 17137; RoHS: YES; Mount: SMD; Case/Package: LQFP; Package Quantity: 1000; Lead Free: Lead Free; Category: INTEGRATED CIRCUITS; Supplier Part Number 1: 768-1010-1-ND; Sub-Category: USB to UART; Stock ID: ??
footprint LQFP48
pins: 1 EESK (out), 2 EEDATA (io), 3 VCC@1 (power), 4 ~{RESET} (in), 5 ~{RSTOUT} (out), 6 3V3OUT (power), 7 USBDP (io), 8 USBDM (io), 9 GND@1 (power), 10 SI/WUA (in), 11 ACBUS3 (io), 12 ACBUS2 (io), 13 ACBUS1 (io), 14 VCCIOA (power), 15 ACBUS0 (io), 16 ADBUS7 (io), 17 ADBUS6 (io), 18 GND@2 (power), 19 ADBUS5 (io), 20 ADBUS4 (io), 21 ADBUS3 (io), 22 ADBUS2 (io), 23 ADBUS1 (io), 24 ADBUS0 (io), 25 GND@3 (power), 26 SI/WUB (in), 27 BCBUS3 (io), 28 BCBUS2 (io), 29 BCBUS1 (io), 30 BCBUS0 (io), 31 VCCIOB (power), 32 BDBUS7 (io), 33 BDBUS6 (io), 34 GND@4 (power), 35 BDBUS5 (io), 36 BDBUS4 (io), 37 BDBUS3 (io), 38 BDBUS2 (io), 39 BDBUS1 (io), 40 BDBUS0 (io), 41 ~{PWREN} (out), 42 VCC@2 (power), 43 XTIN (in), 44 XTOUT (out), 45 AGND (power), 46 AVCC (power), 47 TEST (in), 48 EECS (io)

## FT4232HL-TRAY
designator IC?, comment FT4232HL
IC USB HS QUAD UART/SYNC 64-LQFP; Manufacturer: FTDI; Manufacturer Part Number: FT4232HL-TRAY; Purpose Of Usage: BASIC; Supplier 1: Digi-Key; Stock 1: 1575; RoHS: YES; Mount: SMD; Case/Package: LQFP; Package Quantity: 160; Supplier Part Number 1: 768-1309-ND; Category: INTEGRATED CIRCUITS; Sub-Category: USB to UART; Lead Free: Lead Free; Stock ID: ??
footprint QFP50P1200X1200X160-64N
pins: 1 GND (power), 2 OSCI (in), 3 OSCO (out), 4 VPHY (power), 5 GND (power), 6 REF (in), 7 DM (io), 8 DP (io), 9 VPLL (power), 10 AGND (power), 11 GND (power), 12 VCORE (power), 13 TEST (in), 14 ~{RESET#} (in), 15 GND (power), 16 ADBUS0 (io), 17 ADBUS1 (io), 18 ADBUS2 (io), 19 ADBUS3 (io), 20 VCCIO (power), 21 ADBUS4 (io), 22 ADBUS5 (io), 23 ADBUS6 (io), 24 ADBUS7 (io), 25 GND (power), 26 BDBUS0 (io), 27 BDBUS1 (io), 28 BDBUS2 (io), 29 BDBUS3 (io), 30 BDBUS4 (io), 31 VCCIO (power), 32 BDBUS5 (io), 33 BDBUS6 (io), 34 BDBUS7 (io), 35 GND (power), 36 ~{SUSPEND#} (out), 37 VCORE (power), 38 CDBUS0 (io), 39 CDBUS1 (io), 40 CDBUS2 (io), 41 CDBUS3 (io), 42 VCCIO (power), 43 CDBUS4 (io), 44 CDBUS5 (io), 45 CDBUS6 (io), 46 CDBUS7 (io), 47 GND (power), 48 DDBUS0 (io), 49 VREGOUT (out), 50 VREGIN (power), 51 GND (power), 52 DDBUS1 (io), 53 DDBUS2 (io), 54 DDBUS3 (io), 55 DDBUS4 (io), 56 VCCIO (power), 57 DDBUS5 (io), 58 DDBUS6 (io), 59 DDBUS7 (io), 60 ~{PWREN#} (out), 61 EEDATA (io), 62 EECLK (out), 63 EECS (io), 64 VCORE (power)

## INA190A2NDDFREP
designator IC?
Enhanced product, 40-V, bidirectional, ultraprecise current sense amplifier with picoamp IB & EN 8-SOT-23-THIN -55 to...; Manufacturer: Texas Instruments; Max Supply Voltage: 5.5V; Min Supply Voltage: 2V; Purpose Of Usage: BASIC; Manufacturer Part Number: INA190A2NDDFREP; RoHS: YES; Category: INTEGRATED CIRCUITS; Case/Package: SOT-23-8; Lead Free: Lead Free; Max Operating Temperature: 150°C; Min Operating Temperature: -55°C; Mount: SMD; MSL: 1; Stock ID: ??; Sub-Category: CURRENT SENSE AMPLIFIER; Supplier 1: Digi-Key; Supplier Part Number 1: 296-INA190A2NDDFREPTR-ND
footprint SOT23-8
pins: 1 VS, 2 ENABLE, 3 REF, 4 GND, 5 OUT, 6 NC, 7 IN+, 8 IN-

## ISO1050DUB
designator IC?
EAR99 ISO1050 Tube CANbus interface transceiver 5V 73mA 850.995985mg 74ns; Manufacturer: Texas Instruments; Max Supply Voltage: 5.5V; Min Supply Voltage: 3V; Purpose Of Usage: BASIC; Manufacturer Part Number: ISO1050DUB; RoHS: YES; Category: INTEGRATED CIRCUITS; Case/Package: SOP; Min Operating Temperature: -55°C; Max Operating Temperature: 105°C; Package Quantity: 50; Lead Free: Lead Free; Mount: SMD; Stock ID: ??; Sub-Category: CAN DRIVER; Supplier 1: Digi-Key; Supplier Part Number 1: 296-33295-5-ND
footprint SOP254P1040X485-8N
pins: 1 VCC1, 2 RXD, 3 TXD, 4 GND1, 5 GND2, 6 CANL, 7 CANH, 8 VCC2

## ISO7231CDWR
designator IC?
Digital Isolator Logic 3-CH 25Mbps 16-Pin SOIC T/R; Manufacturer: Texas Instruments; Purpose Of Usage: BASIC; Supplier 1: Digi-Key; Manufacturer Part Number: ISO7231CDWR; Stock 1: 1295; RoHS: YES; Case/Package: SOIC; Package Quantity: 2000; Lead Free: Lead Free; Supplier Part Number 1: 296-38966-1-ND; Category: INTEGRATED CIRCUITS; Mount: SMD; Sub-Category: ISOLATOR; Stock ID: ??
footprint DW16
pins: 1 VCC1, 2 GND1, 3 INA, 4 INB, 5 OUTC, 6 NC, 7 EN1, 8 GND1, 9 GND2, 10 EN2, 11 NC, 12 INC, 13 OUTB, 14 OUTA, 15 GND2, 16 VCC2

## IXDN602SIATR
designator IC?
Tape & Reel (TR) Low-Side 2010 Non-Inverting gate driver 15ns 125C 2A 2A 0.8V 3V; Manufacturer: IXYS; Max Supply Voltage: 35V; Min Supply Voltage: 4.5V; Purpose Of Usage: BASIC; Manufacturer Part Number: IXDN602SIATR; RoHS: YES; Category: INTEGRATED CIRCUITS; Case/Package: SOIC; Lead Free: Lead Free; Max Operating Temperature: 125°C; Min Operating Temperature: -55°C; Local Supplier: OZDISAN; Mount: SMD; Price 10K: 0.5; Stock ID: ??; Sub-Category: GATE DRIVER; Supplier 1: Digi-Key; Supplier Part Number 1: 212-IXDN602SIATR-ND
footprint SO08
pins: 1 NC, 2 IN_A, 3 GND, 4 IN_B, 5 OUT_B, 6 VCC, 7 OUT_A, 8 NC

## LAN9512I-JZX
designator IC?
Microchip LAN9512I-JZX; Ethernet Controller 10/100 Mbits/s; 1.8V; 3.3V; 64-Pin QFN; Purpose Of Usage: BASIC; Supplier 1: Digi-Key; Manufacturer: Microchip; Manufacturer Part Number: LAN9512I-JZX; RoHS: YES; Category: INTEGRATED CIRCUITS; Stock 1: 1672; Case/Package: QFN; Package Quantity: 260; Lead Free: Lead Free; Supplier Part Number 1: LAN9512I-JZX-ND; Local Supplier: AVNET-EBV; Mount: SMD; Price 10K: 5; Stock ID: ??; Sub-Category: ETHERNET INTERFACE ICs
footprint QFN64_9x9MC_MCH-M
pins: 1 USBDM2, 2 USBDP2, 3 USBDM3, 4 USBDP3, 5 VDD33A, 6 NC, 7 NC, 8 NC, 9 NC, 10 VDD33A, 11 VBUS_DET, 12 NRESET, 13 TEST1, 14 PRTXTL2, 15 VDD18CORE, 16 PRTCTL3, 17 NC, 18 NC, 19 VDD33IO, 20 NFDX_LED/GPIO0, 21 NLNKA_LED/GPIO1, 22 NSPD_LED/GPIO2, 23 EECLK, 24 EECS, 25 EEDO, 26 EEDI, 27 VDD33IO, 28 NTRST, 29 TMS, 30 TDI, 31 TDO, 32 TCK, 33 VDD33IO, 34 TEST2, 35 GPIO3, 36 GPIO4, 37 GPIO5, 38 VDD18CORE, 39 VDD33IO, 40 TEST3, 41 AUTOMDIX_EN, 42 GPIO6, 43 GPIO7, 44 CLK24_EN, 45 CLK24_OUT, 46 VDD33IO, 47 TEST4, 48 VDD18ETHPLL, 49 VDD33A, 50 EXRES, 51 VDD33A, 52 RXP, 53 RXN, 54 VDD33A, 55 TXP, 56 TXN, 57 VDD33A, 58 USBDM0, 59 USBDP0, 60 XO, 61 XI, 62 VDD18USBPLL, 63 USBRBIAS, 64 VDD33A, 65 EPAD

## LM75BD,118
designator IC?
LM75 Series 5.5 V I2C Digital Temperature Sensor and Thermal Watchdog - SOIC-8; Manufacturer: NXP Semiconductors; Purpose Of Usage: BASIC; Manufacturer Part Number: LM75BD,118; RoHS: YES; Category: INTEGRATED CIRCUITS; Case/Package: SOIC; Min Operating Temperature: -55°C; Max Operating Temperature: 125°C; Stock ID: ??; Mount: SMD; Sub-Category: TEMPERATURE SENSOR; Supplier 1: Digi-Key; Supplier Part Number 1: 568-4688-1-ND
footprint SO08
pins: 1 SDA, 2 SCL, 3 OS, 4 GND, 5 A2, 6 A1, 7 A0, 8 VDD

## LM317MDT-TR
designator IC?
STMICROELECTRONICS - LM317MDT-TR - ADJUSTABLE LINEAR REGULATOR, 1.2V TO 37V, DPAK-3; Purpose Of Usage: BASIC; Topology: LDO; Supplier 1: Digi-Key; Manufacturer: STMicroelectronics; Manufacturer Part Number: LM317MDT-TR; Stock 1: 89593; RoHS: YES; Mount: SMD; Case/Package: TO-252; Package Quantity: 1; Lead Free: Lead Free; Supplier Part Number 1: 497-1574-1-ND; Category: INTEGRATED CIRCUITS; Sub-Category: PMIC - LINEAR REGULATOR; Stock ID: ??
footprint DPAK
pins: 1 ADJ, 2 In, 3 Out

## LM1117MPX-3.3/NOPB
designator IC?
TEXAS INSTRUMENTS   LM1117MPX-3.3/NOPB.   LINEAR REG, FIX, 3.3V, 800MA, SOT-223-4, FULL REEL; Purpose Of Usage: BASIC; Topology: LDO; Supplier 1: Digi-Key; Manufacturer: Texas Instruments; Manufacturer Part Number: LM1117MPX-3.3/NOPB; RoHS: YES; Stock 1: 74620; Mount: SMD; Case/Package: SOT-223; Lead Free: Lead Free; Category: INTEGRATED CIRCUITS; Supplier Part Number 1: LM1117MPX-3.3/NOPBCT-ND; Sub-Category: PMIC - VOLTAGE REFERANCE; Stock ID: ??
footprint SOT223-3
pins: 1 GND, 2 Out, 3 In, 4 Out

## LP5907MFX-3.3/NOPB
designator IC?
Linear Voltage Regulator IC Positive Fixed 1 Output 250mA SOT-23-5; Manufacturer: TEXAS; Purpose Of Usage: BASIC; Topology: LDO; Max Supply Voltage: 5.5V; Min Supply Voltage: 3.6V; Supplier 1: Digi-Key; Manufacturer Part Number: LP5907MFX-3.3/NOPB; Stock 1: 5836; RoHS: YES; Mount: SMD; Case/Package: SOT-23-5; Package Quantity: 3000; Lead Free: Lead Free; Category: INTEGRATED CIRCUITS; Sub-Category: PMIC - LINEAR REGULATOR; Supplier Part Number 1: 296-38557-2-ND; Stock ID: ??; Max Operating Temperature: +125; Min Operating Temperature: -40; MSL: 1
footprint SOT23-5
pins: 1 IN, 2 GND, 3 EN, 4 N.C., 5 OUT

## LP591250MDRVREP
designator IC?
Enhanced-product, 500-mA low-noise low-IQ low-dropout regulator with reverse current pr 6-WSON -55 to 125; Manufacturer: Texas Instruments; Max Supply Voltage: 6.5V; Min Supply Voltage: 1.8V; Purpose Of Usage: BASIC; Topology: LDO; Manufacturer Part Number: LP591250MDRVREP; RoHS: YES; Case/Package: WSON-6; Category: INTEGRATED CIRCUITS; Lead Free: Lead Free; Max Operating Temperature: 125°C; Min Operating Temperature: -55°C; Mount: SMD; MSL: 1; Stock ID: ??; Sub-Category: PMIC - LINEAR REGULATOR; Supplier 1: Digi-Key; Supplier Part Number 1: 296-LP591250MDRVREPTR-ND
footprint WSON-6 DRV0006A (SON, 6-Leads, Body 1.98x1.98mm, Pitch 0.65mm, Thermal Pad 1.60x0.91mm, IPC Medium Density)
pins: 1 OUT, 2 NC, 3 PG, 4 EN, 5 GND, 6 IN, 7 EXPOS

## LT1999MPMS8-10#PBF
designator IC?
SP Amp Current Sense Amp Single 5.5V 8-Pin MSOP Tube; Manufacturer: Analog Devices / Linear Technology; Min Supply Voltage: 4.5V; Purpose Of Usage: BASIC; Manufacturer Part Number: LT1999MPMS8-10#PBF; RoHS: YES; Category: INTEGRATED CIRCUITS; Lead Free: Lead Free; Max Operating Temperature: 150°C; Max Supply Voltage: 5.5V; Min Operating Temperature: -55°C; Mount: SMD; Stock ID: ??; Sub-Category: OPAMPS - CURRENT SENSE AMPLIFER; Supplier 1: Digi-Key; Supplier Part Number 1: LT1999MPMS8-10#PBF-ND
footprint MSOP-08 (TSOP, 8-Leads, Body 2.95x2.95mm, Pitch 0.65mm, IPC Medium Density)
pins: 1 V+, 2 IN_P, 3 IN_N, 4 V+, 5 GND, 6 REF, 7 OUT, 8 ~{SHDN}

## LT3061MPMS8EPBF
designator IC?
LDO Regulator Pos 0.6V to 19V 0.1A Automotive 8-Pin MSOP EP Tube; Manufacturer: Analog Devices / Linear Technology; Manufacturer Part Number: LT3061MPMS8E#PBF-ND; Max Supply Voltage: 45V; Purpose Of Usage: BASIC; RoHS: YES; Category: INTEGRATED CIRCUITS; Case/Package: MSOP-8; Min Operating Temperature: -55°C; Max Operating Temperature: 150°C; Supplier 1: Digi-Key; Supplier Part Number 1: LT3061MPMS8E#PBF-ND; Lead Free: Lead Free; Mount: SMD; Stock ID: ??; Sub-Category: PMIC - LINEAR REGULATOR
footprint MSOP-08 (TSOP, 8-Leads, Body 2.95x2.95mm, Pitch 0.65mm, IPC Medium Density)
pins: 1 REF/BYP, 2 ADJ, 3 OUT, 4 OUT, 5 IN, 6 IN, 7 ~{SHDN}, 8 GND

## LTC6993MPS6-4#TRMPBF
designator IC?
Monostable Multivibrator Single-Element -55C 125C 6-Pin TSOT-23 T/R; Manufacturer: Analog Devices; Max Supply Voltage: 5.5V; Min Supply Voltage: 2.25V; Purpose Of Usage: BASIC; Manufacturer Part Number: LTC6993MPS6-4#TRMPBF; RoHS: YES; Category: INTEGRATED CIRCUITS; Case/Package: SOT-23-6; Max Operating Temperature: 125°C; Min Operating Temperature: -55°C; Lead Free: Lead Free; Mount: SMD; MSL: 1; Sub-Category: Multivibrators; Supplier 1: Digi-Key; Supplier Part Number 1: LTC6993MPS6-4#TRMPBFTR-ND
footprint SOT23-6 (SOT23, 6-Leads, Body 2.73x2.80mm, Pitch 0.95mm, IPC Medium Density)
pins: 1 TRIG, 2 GND, 3 SET, 4 DIV, 5 V+, 6 OUT

## M24C64-RDW6TP
designator *
IC EEPROM 64KBIT 400KHZ 8TSSOP; Manufacturer: STMicroelectronics; Manufacturer Part Number: M24C64-RDW6TP; Purpose Of Usage: BASIC; RoHS: YES; Category: INTEGRATED CIRCUITS; Supplier 1: Digi-Key; Supplier Part Number 1: 497-8647-1-ND; Case/Package: SOIC; Lead Free: Lead Free; Local Supplier: FUTURE; Mount: SMD; Stock ID: ??; Sub-Category: MEMORY - EEPROM
pins: 1 A0, 2 A1, 3 A2, 4 GND, 5 SDA, 6 SCL, 7 WP, 8 VCC

## MAX485CSA+
designator IC?
IC TXRX RS485/RS422 LOWPWR 8SOIC; Manufacturer: Maxim; Purpose Of Usage: BASIC; Supplier 1: Digi-Key; Manufacturer Part Number: MAX485CSA+; RoHS: YES; Stock 1: 4088; Mount: SMD; Case/Package: SOIC; Package Quantity: 100; Lead Free: Lead Free; Supplier Part Number 1: MAX485CSA+-ND; Category: INTEGRATED CIRCUITS; Sub-Category: RS485 DRIVER; Stock ID: ??
footprint SOIC127P600X175-8N (SOIC, 8-Leads, Body 4.90x3.90mm, Pitch 1.27mm, IPC Medium Density)
pins: 1 RO (out), 2 RE (in), 3 DE (in), 4 DI (in), 5 GND (power), 6 A (io), 7 B (io), 8 VCC (power)

## MAX3232ECDR
designator IC?
IC RS232 3V5.5V 15KVESD 16-SOIC; Manufacturer: Texas Instruments; Purpose Of Usage: BASIC; Supplier 1: Digi-Key; Supplier Part Number 1: 296-19851-1-ND; Manufacturer Part Number: MAX3232ECDR; RoHS: YES; Stock 1: 15857; Mount: SMD; Case/Package: SOIC; Package Quantity: 1; Lead Free: Lead Free; Category: INTEGRATED CIRCUITS; Sub-Category: RS232 to TTL; Stock ID: ??
footprint SO16
pins: 1 C1+, 2 V+, 3 C1-, 4 C2+, 5 C2-, 6 V-, 7 DOUT2 (out), 8 RIN2 (in), 9 ROUT2 (out), 10 DIN2 (in), 11 DIN1 (in), 12 ROUT1 (out), 13 RIN1 (in), 14 DOUT2 (out), 15 GND, 16 VCC

## MAX3485ECSA+T
designator IC?
IC TXRX RS485/422 10MBPS 8SOIC; Manufacturer: Maxim; Purpose Of Usage: BASIC; Supplier 1: Digi-Key; Supplier Part Number 1: MAX3485ECSA+CT-ND; Manufacturer Part Number: MAX3485ECSA+T; RoHS: YES; Stock 1: 2261; Mount: SMD; Case/Package: SOIC; Package Quantity: 2500; Category: INTEGRATED CIRCUITS; Sub-Category: RS485 DRIVER; Lead Free: Lead Free; Stock ID: ??
footprint SOIC127P600X175-8N (SOIC, 8-Leads, Body 4.90x3.90mm, Pitch 1.27mm, IPC Medium Density)
pins: 1 RO (out), 2 RE_ (in), 3 DE (in), 4 DI (in), 5 GND (power), 6 A (io), 7 B (io), 8 VCC (power)

## MAX6504UKN025+T
designator IC?
Low-Cost, +2.7V to +5.5V, Micropower Temperature Switches in SOT23; Manufacturer: Maxim; Max Supply Voltage: 5.5V; Min Supply Voltage: 2.7V; Purpose Of Usage: BASIC; Manufacturer Part Number: MAX6504UKN025+T; RoHS: YES; Category: INTEGRATED CIRCUITS; Case/Package: SOT-23-5; Min Operating Temperature: -55°C; Max Operating Temperature: 125°C; Lead Free: Lead Free; Supplier 1: Digi-Key; Supplier Part Number 1: 175-MAX6504UKN025+TTR-ND; Mount: SMD; Stock ID: ??; Sub-Category: TEMPERATURE SWITCHES; MSL: 1
footprint SOT23-5 (SOT23, 6-Leads, Body 2.73x2.80mm, Pitch 0.95mm, IPC Medium Density)
pins: 1 GND, 2 GND, 3 HYST, 4 VCC, 5 T_UNDER

## MAX22025FAWA+
designator IC?
IC Transceiver Half 1/1 8SOIC; Manufacturer: Analog Devices; Purpose Of Usage: BASIC; Manufacturer Part Number: MAX22025FAWA+; RoHS: NO; Category: INTEGRATED CIRCUITS; Case/Package: WIDE SOIC; Lead Free: Lead Free; Max Operating Temperature: 85°C; Min Operating Temperature: -40°C; Mount: SMD; Stock ID: ??; Sub-Category: RS485 DRIVER; Supplier 1: Digi-Key; Supplier Part Number 1: 505-MAX22025FAWA+-ND
footprint WIDE SOIC 08
pins: 1 RXD, 2 TXD, 3 VDDA, 4 GNDA, 5 GNDB, 6 A, 7 B, 8 VDDB

## MAX31865ATP+
designator IC?
RTD-to-Digital Converter; Manufacturer: Maxim; Purpose Of Usage: BASIC; Case/Package: QFN-20; Category: INTEGRATED CIRCUITS; Lead Free: Lead Free; Manufacturer Part Number: MAX31865ATP+; Max Operating Temperature: 125°C; Min Operating Temperature: -40°C; Mount: SMD; MSL: 1; RoHS: YES; Stock ID: ??; Sub-Category: SENSOR INTERFACE; Supplier 1: Digi-Key; Supplier Part Number 1: MAX31865ATP+-ND
footprint QFN65P500X500X80-21N
pins: 1 BIAS, 2 REFIN+, 3 REFIN-, 4 ISENSOR, 5 FORCE+, 6 FORCE2, 7 RTDIN+, 8 RTDIN-, 9 FORCE-, 10 GND2, 11 SDI, 12 SCLK, 13 ~{CS}, 14 SDO, 15 DGND, 16 GND1, 17 NC, 18 ~{DRDY}, 19 DVDD, 20 VDD, 21 EP

## MC74HC595ADR2G
designator IC?
ON SEMICONDUCTOR - MC74HC595ADR2G - 8 BIT SIPO/SISO SHIFT REGISTER SOIC16; Purpose Of Usage: BASIC; Supplier 1: Digi-Key; Manufacturer: ON Semiconductor; Manufacturer Part Number: MC74HC595ADR2G; Stock 1: 804; RoHS: YES; Mount: SMD; Case/Package: SOIC; Package Quantity: 2500; Lead Free: Lead Free; Category: INTEGRATED CIRCUITS; Supplier Part Number 1: MC74HC595ADR2GOSCT-ND; Sub-Category: LOGIC; Stock ID: ??
footprint SO16
pins: 1 B, 2 C, 3 D, 4 E, 5 F, 6 G, 7 H, 8 GND, 9 SQH, 10 RST, 11 CLK, 12 LATCH, 13 OE, 14 DATA, 15 A, 16 VCC

## MC74VHC1G08DTT1G
designator IC?
MC74VHC1G08 Series 2 to 5.5 SMT Single 2 Input AND Gate - SOT-23-5; Manufacturer: ON Semiconductor; Max Supply Voltage: 5.5V; Min Supply Voltage: 2V; Purpose Of Usage: BASIC; Manufacturer Part Number: MC74VHC1G08DTT1G; RoHS: YES; Category: INTEGRATED CIRCUITS; Case/Package: SOT-23-5; Min Operating Temperature: -55°C; Max Operating Temperature: 125°C; Package Quantity: 1; Lead Free: Lead Free; Supplier 1: Digi-Key; Supplier Part Number 1: MC74VHC1G08DTT1GOSTR-ND; Mount: SMD; MSL: 1; Stock ID: ??; Sub-Category: LOGIC
footprint SOT23-5 (SOT23, 6-Leads, Body 2.73x2.80mm, Pitch 0.95mm, IPC Medium Density)
pins: 1 B, 2 A, 3 GND, 4 Y, 5 VCC

## MC74VHC1G86DFT1
designator IC?
XOR Gate 1-Element 2-IN CMOS 5-Pin SC-70 T/R - Bulk (Alt: MC74VHC1G86DFT1); Manufacturer: ON Semiconductor; Max Supply Voltage: 5.5V; Min Supply Voltage: 2V; Purpose Of Usage: BASIC; Manufacturer Part Number: MC74VHC1G86DFT1; RoHS: NO; Category: INTEGRATED CIRCUITS; Case/Package: SC-88A; Min Operating Temperature: -55°C; Max Operating Temperature: 125°C; Lead Free: Contains Lead; Supplier 1: Digi-Key; Supplier Part Number 1: 2156-MC74VHC1G86DFT1-ONTR-ND; Mount: SMD; Stock ID: ??; Sub-Category: LOGIC
footprint SC-88A
pins: 1 B, 2 A, 3 GND, 4 Y, 5 VCC

## MC74VHC1GU04DFT2
designator IC?
Unbuffered Single Inverter; Manufacturer: ON Semiconductor; Manufacturer Part Number: MC74VHC1GU04DFT2G-Q; Max Supply Voltage: 5.5V; Min Supply Voltage: 2V; Purpose Of Usage: BASIC; RoHS: NO; Case/Package: SC-88A; Category: INTEGRATED CIRCUITS; Lead Free: Lead Free; Max Operating Temperature: 125°C; Min Operating Temperature: -55°C; Mount: SMD; MSL: 1; Stock ID: ??; Sub-Category: LOGIC; Supplier 1: Digi-Key; Supplier Part Number 1: 2156-MC74VHC1GU04DFT2-ONTR-ND
footprint SC-88A
pins: 1 NC, 2 A, 3 GND, 4 Y, 5 VCC

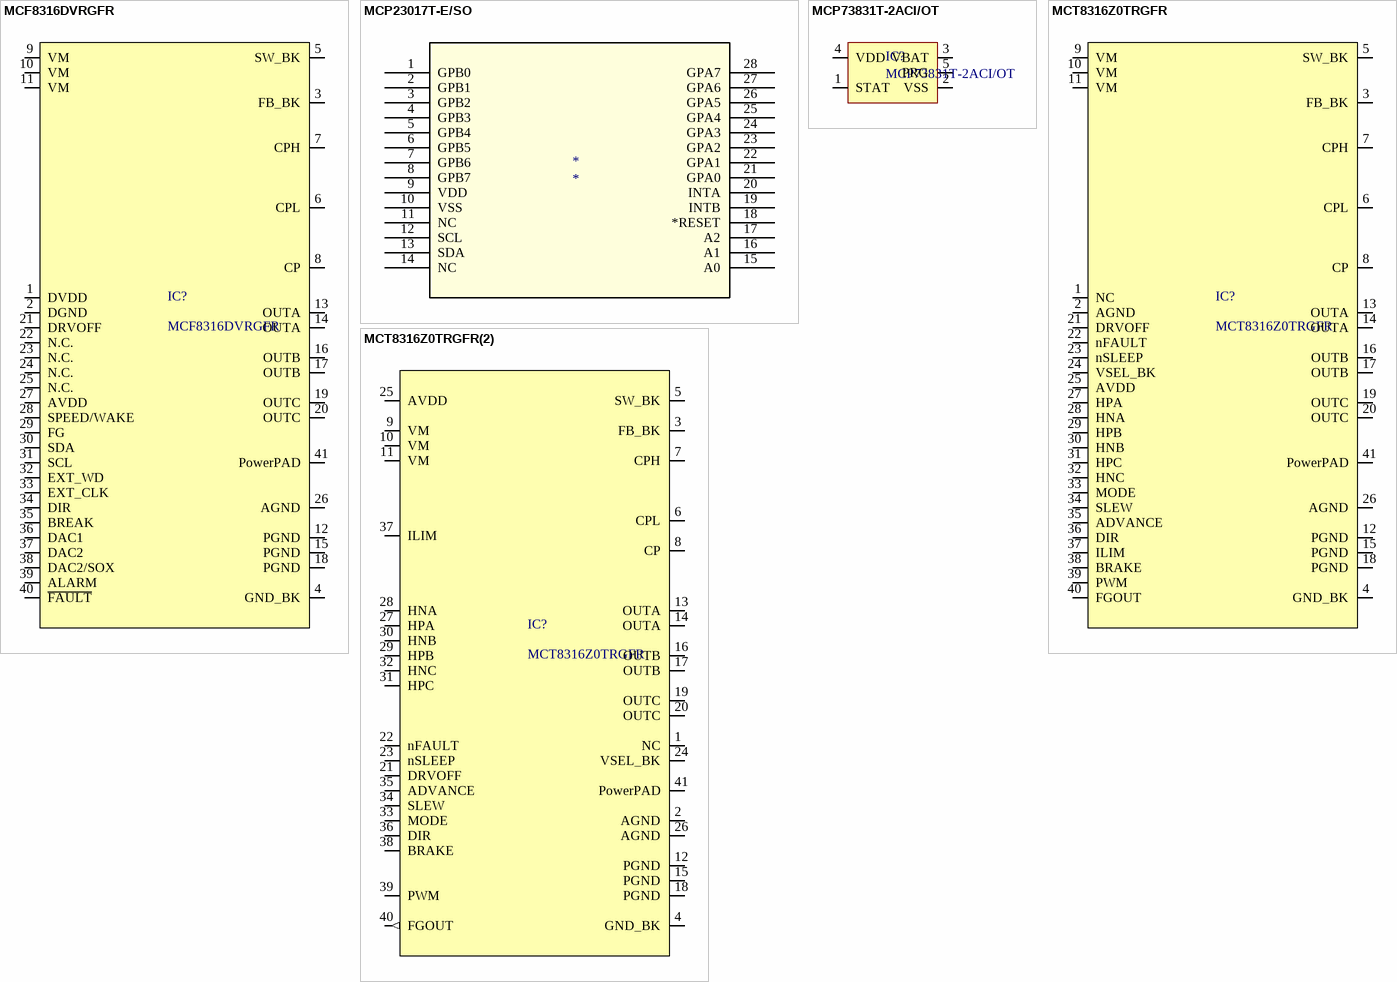
[diagram p4: symbols MCF8316DVRGFR to MCT8316Z0TRGFR(2)]

## MCF8316DVRGFR
designator IC?
Motor Driver NMOS Analog, I2C, PWM 40-VQFN (7x5) 40-VQFN (7x5); Manufacturer: Texas Instruments; Max Supply Voltage: 35V; Min Supply Voltage: 4.5V; Purpose Of Usage: BASIC; Topology: BRUSHLESS DC; Manufacturer Part Number: MCF8316DVRGFR; RoHS: YES; Category: INTEGRATED CIRCUITS; Case/Package: VFQFN-40; Max Operating Temperature: 125°C; Min Operating Temperature: -40°C; Mount: SMD; MSL: 2; Stock ID: ??; Sub-Category: MOTOR DRIVER; Supplier 1: Digi-Key; Supplier Part Number 1: 296-MCF8316DVRGFRTR-ND; Lead Free: Lead Free
footprint VQFN40_7X5_TEX
pins: 1 DVDD, 2 DGND (power), 3 FB_BK, 4 GND_BK (power), 5 SW_BK, 6 CPL, 7 CPH, 8 CP, 9 VM, 10 VM, 11 VM, 12 PGND (power), 13 OUTA, 14 OUTA, 15 PGND (power), 16 OUTB, 17 OUTB, 18 PGND (power), 19 OUTC, 20 OUTC, 21 DRVOFF, 22 N.C., 23 N.C., 24 N.C., 25 N.C. (power), 26 AGND (power), 27 AVDD, 28 SPEED/WAKE, 29 FG, 30 SDA, 31 SCL, 32 EXT_WD, 33 EXT_CLK, 34 DIR, 35 BREAK, 36 DAC1, 37 DAC2, 38 DAC2/SOX, 39 ALARM, 40 ~{FAULT}, 41 PowerPAD

## MCP23017T-E/SO
designator *
IC I/O EXPANDER I2C 16B 28SOIC; Manufacturer: Microchip; Manufacturer Part Number: MCP23017T-E/SO; Purpose Of Usage: BASIC; Supplier 1: Digi-Key; Stock 1: 9970; RoHS: YES; Case/Package: SOIC; Package Quantity: 1600; Lead Free: Lead Free; Supplier Part Number 1: MCP23017T-E/SOCT-ND; Category: INTEGRATED CIRCUITS; Sub-Category: PORT EXPANDER; Mount: SMD; Stock ID: ??
footprint SOIC28-W_MC
pins: 1 GPB0, 2 GPB1, 3 GPB2, 4 GPB3, 5 GPB4, 6 GPB5, 7 GPB6, 8 GPB7, 9 VDD, 10 VSS, 11 NC, 12 SCL, 13 SDA, 14 NC, 15 A0, 16 A1, 17 A2, 18 *RESET, 19 INTB, 20 INTA, 21 GPA0, 22 GPA1, 23 GPA2, 24 GPA3, 25 GPA4, 26 GPA5, 27 GPA6, 28 GPA7

## MCP73831T-2ACI/OT
designator IC?
MCP73831 Series Single-Cell Li-Ion/Li-Polymer Battery Charge Controller SOT-23-5; Manufacturer: Microchip; Purpose Of Usage: BASIC; Topology: CC-CV; Supplier 1: Digi-Key; Manufacturer Part Number: MCP73831T-2ACI/OT; Stock 1: 24984; RoHS: YES; Mount: SMD; Case/Package: SOT-23; Lead Free: Lead Free; Category: INTEGRATED CIRCUITS; Supplier Part Number 1: MCP73831T-2ACI/OTCT-ND; Sub-Category: PMIC - Battery Charger; Stock ID: ??
footprint SOT-23-5
pins: 1 STAT, 2 VSS, 3 VBAT, 4 VDD, 5 PRG